# Altium footprint library Connectors.PcbLib: 320 footprints (part 11 of 20)
Each footprint in its own frame and in the unit in brackets; x right, y up, seen from the top. Pads: shape width x height; smd on the part's side, far side on the other; paste and mask are expansions set on the pad; w line width, h text height; cw(c..) or ccw(c..) is an arc to the next point about the centre after c.
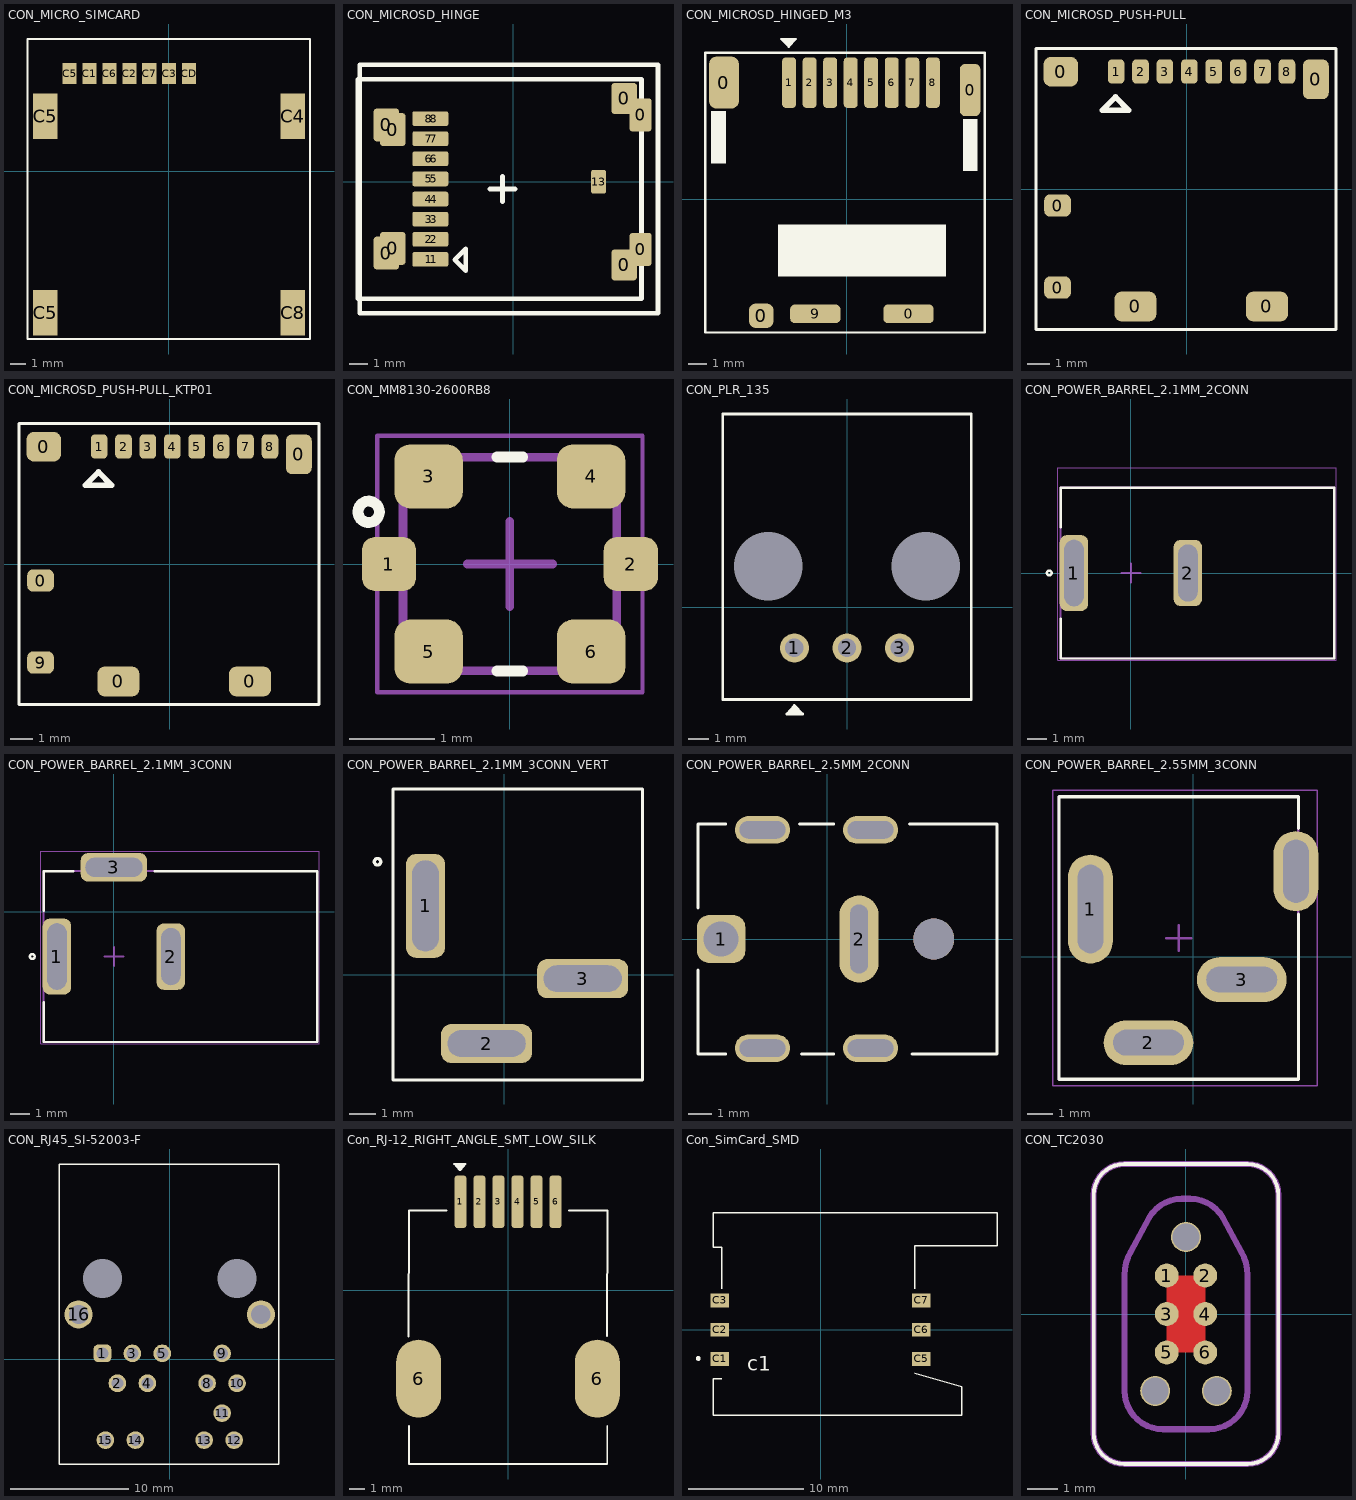
[diagram p10: the footprints below, top view; thin cyan lines are the x and y axes]

## CON_MICRO_SIMCARD [mm] "/20210224/J-E.Pachon"
pads (11):
  rect 0.9x1.35 smd: C1(-5.07,6.235) C2(-2.53,6.235) C3(0.01,6.235) C5(-6.34,6.235) C6(-3.8,6.235) C7(-1.26,6.235) CD(1.28,6.235)
  rect 1.55x2.9 smd: C4(7.9,3.505) C5(-7.9,-9) C5(-7.9,3.505) C8(7.9,-9)
Top Overlay:
  lines w0.127: -9.02,-10.685 -9.02,8.445 8.99,8.445 8.99,-10.685 -9.02,-10.685
3D body: height 1.35, standoff 0, extent -8.72,-10.685 8.722,7.525

## CON_MICROSD_HINGE [mm] "/ 20190710  / C-A.Serna.A"
height 2
pads (25):
  rrect25% 1.4x1.8 smd: 0(-6.95,-3.9) 0(-6.95,3.1) 0(-6.6,-3.65) 0(-6.6,2.85)
  rrect25% 1.4x1.7 smd: 0(6.05,-4.55) 0(6.05,4.55)
  rrect25% 1.2x1.8 smd: 0(6.95,-3.7) 0(6.95,3.65)
  rrect25% 1.8x0.8 smd: 1(-4.625,-4.25) 2(-4.625,-3.15) 3(-4.625,-2.05) 4(-4.625,-0.95) 5(-4.625,0.15) 6(-4.625,1.25) 7(-4.625,2.35) 8(-4.625,3.45)
  rrect25% 1.6x0.8 smd: 1(-4.365,-4.25) 2(-4.365,-3.15) 3(-4.365,-2.05) 4(-4.365,-0.95) 5(-4.365,0.15) 6(-4.365,1.25) 7(-4.365,2.35) 8(-4.365,3.45)
  rrect25% 0.8x1.3 smd: 13(4.65,0)
Top Overlay:
  lines w0.254: -0.6,-0.4 -0.6,0.3 -0.6,-0.4 ; -0.6,-0.4 -0.6,-1.1 -0.6,-0.4 ; -0.6,-0.4 -1.3,-0.4 -0.6,-0.4 ; -0.6,-0.4 0.1,-0.4 -0.6,-0.4 ; -8.5,-6.4 -8.5,5.6 7,5.6 7,-6.4 -8.5,-6.4 ; -8.4,-7.2 7.9,-7.2 7.9,6.4 -8.4,6.4 -8.4,-7.2 ; -3.2,-4.275 -2.6,-3.675 -2.6,-4.875 -3.2,-4.275
3D body: height 2, standoff 0, extent -8.632,-7.375 8.082,6.512

## CON_MICROSD_HINGED_M3 [mm] "/20200714/N-A.Potosi"
pads (13):
  rrect50% 1.6x2.8 smd: 0(-6.6,6.25)
  rrect50% 1.3x1.3 smd: 0(-4.6,-6.25)
  rrect50% 2.7x1 smd: 0(3.3,-6.15) 9(-1.7,-6.15)
  rrect50% 1.1x2.8 smd: 0(6.6,5.85)
  rrect50% 0.75x2.7 smd: 1(-3.1,6.25) 2(-2,6.25) 3(-0.9,6.25) 4(0.2,6.25) 5(1.3,6.25) 6(2.4,6.25) 7(3.5,6.25) 8(4.6,6.25)
Top Overlay:
  region: 7.01,4.3 6.21,4.3 6.21,1.5 7.01,1.5
  region: 5.3,-1.35 -3.7,-1.35 -3.7,-4.15 5.3,-4.15
  region: -6.5,4.72 -7.3,4.72 -7.3,1.92 -6.5,1.92
  region: -2.758,8.589 -3.52,8.589 -3.124,8.175
  lines w0.127: -7.6,-7.15 7.38,-7.15 7.38,7.849 -7.6,7.849 -7.6,-7.15 ; -3.52,8.589 -3.124,8.175 -2.758,8.589 -3.52,8.589
3D body "DM3CS-SF.stp": height 1.98, standoff 0.05, extent -7,-6.85 6.8,7.25

## CON_MICROSD_PUSH-PULL [mm] "/20201014/J-E.Pachon"
pads (14):
  rrect50% 1.2x1 smd: 0(-5.82,-4.445) 0(-5.82,-0.745)
  rrect50% 1.55x1.35 smd: 0(-5.67,5.285)
  rrect50% 1.9x1.35 smd: 0(-2.31,-5.295) 0(3.62,-5.295)
  rrect50% 1.17x1.8 smd: 0(5.82,4.945)
  rrect50% 0.75x1.1 smd: 1(-3.18,5.295) 2(-2.08,5.295) 3(-0.98,5.295) 4(0.12,5.295) 5(1.22,5.295) 6(2.32,5.295) 7(3.42,5.295) 8(4.52,5.295)
Top Overlay:
  lines w0.127: -6.79,-6.325 -6.79,6.325 6.73,6.325 6.73,-6.325 -6.79,-6.325
  lines w0.254: -3.81,3.545 -2.61,3.545 -3.21,4.145 -3.81,3.545
3D body "1040310811.stp": height 1.34, standoff -0.11, extent -6.075,-5.825 5.875,5.575

## CON_MICROSD_PUSH-PULL_KTP01 [mm] "/20220721/F-A.Ospina"
pads (14):
  rrect50% 1.2x1 smd: 0(-5.82,-0.745) 9(-5.82,-4.445)
  rrect50% 1.55x1.35 smd: 0(-5.67,5.285)
  rrect50% 1.9x1.35 smd: 0(-2.31,-5.295) 0(3.62,-5.295)
  rrect50% 1.17x1.8 smd: 0(5.82,4.945)
  rrect50% 0.75x1.1 smd: 1(-3.18,5.295) 2(-2.08,5.295) 3(-0.98,5.295) 4(0.12,5.295) 5(1.22,5.295) 6(2.32,5.295) 7(3.42,5.295) 8(4.52,5.295)
Top Overlay:
  lines w0.127: -6.79,-6.325 6.73,-6.325 6.73,6.325 -6.79,6.325 -6.79,-6.325
  lines w0.254: -3.81,3.545 -3.21,4.145 -2.61,3.545 -3.81,3.545
3D body "1040310811.stp": height 1.34, standoff -0.11, extent -6.075,-5.825 5.875,5.575

## CON_MM8130-2600RB8 [mm] "/ 20190222 / C-A.Serna.A"
pads (6):
  rrect50% 0.635x0.635 smd: 1(-1.414,0) 2(1.414,0)
  rrect50% 0.8x0.75 smd: 3(-0.95,1.025) 4(0.95,1.025) 5(-0.95,-1.025) 6(0.95,-1.025)
Top Overlay:
  circle w0.127: c-1.651,0.61 r0.125
  lines w0.127: -0.15,-1.25 0.15,-1.25 ; -0.15,1.25 0.15,1.25
Mechanical 1:
  lines w0.1: -1.25,-1.25 -1.25,1.25 1.25,1.25 1.25,-1.25 -1.25,-1.25
Mechanical 15:
  lines w0.05: -1.55,-1.5 1.55,-1.5 1.55,1.5 -1.55,1.5 -1.55,-1.5
  lines w0.1: -0.5,0 0.5,0 ; 0,-0.5 0,0.5
3D body "MS-156C3.stp": height 1.36, standoff 0.01, extent -1.16,-1.15 1.14,1.15

## CON_PLR_135 [mm] "/20200728/M-C.Calderon"
pads (5):
  round 1.4 hole 0.889: 1(-2.54,-1.975) 2(0,-1.975) 3(2.54,-1.975)
  round 3.2 hole 3.302 unplated: ""(-3.81,1.975) ""(3.81,1.975)
Top Overlay:
  region: -2.907,-5.166 -2.145,-5.166 -2.54,-4.752
  lines w0.127: -5.994,-4.464 5.994,-4.464 5.994,9.328 0,9.328 -5.994,9.328 -5.994,-4.464 ; -2.907,-5.166 -2.54,-4.752 -2.145,-5.166 -2.907,-5.166
3D body "PLR135-T1.STEP": height 11.52, standoff -4.08, extent -5.75,-4.266 5.75,9.334

## CON_POWER_BARREL_2.1MM_2CONN [mm] "/ 20191002 / C-D Viveros"
pads (2):
  rrect50% 1.5x4 hole 1.016 slot 3.5 at 90 deg: 1(-3,0)
  rrect50% 1.5x3.5 hole 1.016 slot 3 at 90 deg: 2(3,0)
Top Overlay:
  circle w0.127: c-4.3,0 r0.125
  lines w0.127: -3.7,-2.4 -3.7,-4.5 10.7,-4.5 10.7,4.5 -3.7,4.5 -3.7,2.4
Mechanical 1:
  lines w0.1: -3.7,-4.5 10.7,-4.5 10.7,4.5 -3.7,4.5 -3.7,-4.5
Mechanical 15:
  lines w0.05: -3.85,-4.6 10.8,-4.6 10.8,5.55 -3.85,5.55 -3.85,-4.6
  lines w0.1: -0.5,0 0.5,0 ; 0,-0.5 0,0.5
3D body "CUI_PJ-037AH.step": height 11.01, standoff -3.49, extent -3.95,-4.5 10.55,4.5

## CON_POWER_BARREL_2.1MM_3CONN [mm] "/ 20190222 / C-A.Serna.A"
pads (3):
  rrect50% 1.5x4 hole 1.016 slot 3.5 at 90 deg: 1(-3,-2.35)
  rrect50% 1.5x3.5 hole 1.016 slot 3 at 90 deg: 2(3,-2.35)
  rrect50% 3.5x1.5 hole 1.016 slot 3 at 0 deg: 3(0,2.35)
Top Overlay:
  circle w0.127: c-4.3,-2.35 r0.125
  lines w0.127: -3.7,-4.75 -3.7,-6.85 10.7,-6.85 10.7,2.15 2.15,2.15 ; -3.7,0.05 -3.7,2.15 -2.15,2.15
Mechanical 1:
  lines w0.1: -3.7,-6.85 10.7,-6.85 10.7,2.15 -3.7,2.15 -3.7,-6.85
Mechanical 15:
  lines w0.05: -3.85,-6.95 10.8,-6.95 10.8,3.2 -3.85,3.2 -3.85,-6.95
  lines w0.1: -0.5,-2.35 0.5,-2.35 ; 0,-2.85 0,-1.85
3D body "pj-002a.stp": height 11, standoff -3.5, extent -3.7,-6.85 10.7,2.55

## CON_POWER_BARREL_2.1MM_3CONN_VERT [mm] "/20220804/J-E.Pachon"
pads (3):
  rrect50% 1.5x4 hole 1.016 slot 3.5 at 90 deg: 1(-3.025,2.65)
  rrect50% 3.5x1.5 hole 1.016 slot 3 at 0 deg: 2(-0.675,-2.65) 3(3.025,-0.15)
Top Overlay:
  circle w0.127: c-4.875,4.35 r0.125
  lines w0.127: -4.275,-4.05 -4.275,7.15 5.325,7.15 5.325,-4.05 -4.275,-4.05
3D body "694106402002 (rev1).stp": height 13.31, standoff -4.29, extent -3.975,-3.8 5.025,6.9

## CON_POWER_BARREL_2.5MM_2CONN [mm] "/ 20200522/ J-P.Vargas.A"
pads (7):
  rrect50% 2.1x2.1 hole 1.524: 1(-4.625,0)
  oval 1.7x3.8 hole 0.762 slot 3 at 90 deg: 2(1.375,0)
  oval 2.4x1.2 hole 0.762 slot 2 at 0 deg: ""(-2.825,-4.75) ""(-2.825,4.75) ""(1.875,-4.75) ""(1.875,4.75)
  round 1.778 hole 1.778 unplated: ""(4.625,0)
Top Overlay:
  lines w0.127: -5.625,-1.35 -5.625,-5 -4.425,-5 ; -5.625,1.35 -5.625,5 -4.425,5 ; -1.225,5 0.275,5 ; -1.125,-5 0.275,-5 ; 3.575,5 7.375,5 7.375,-5 3.675,-5
3D body "JACK-C-PC-10A-RA(R).stp": height 10.01, standoff -2.19, extent -5.604,-5.002 7.396,5.002

## CON_POWER_BARREL_2.55MM_3CONN [mil] "/ 20190617/ J-P.Vargas.A"
pads (4):
  oval 70x170 hole 40 slot 137.8 at 90 deg: 1(-160.43,74.8)
  oval 140x70 hole 40 slot 110.24 at 0 deg: 2(-69.88,-133.86) 3(75.79,-35.43)
  oval 70x125 hole 40 slot 98.43 at 90 deg: ""(160.43,133.86)
Top Overlay:
  lines w5: 164.37,66.93 164.37,-190.94 -209.65,-190.94 -209.65,250 164.37,250 164.37,200.79
Mechanical 1:
  lines w3.94: -209.65,-190.94 164.37,-190.94 164.37,250 -209.65,250 -209.65,-190.94
Mechanical 15:
  lines w1.97: -219.49,-200.79 193.9,-200.79 193.9,259.84 -219.49,259.84 -219.49,-200.79
  lines w3.94: -42.32,29.53 -2.95,29.53 ; -22.64,9.84 -22.64,49.21
3D body "dcj250-15-a-k1-c_reva.step": height 572.83, standoff -57.18, extent -209.65,-190.94 164.37,250

## CON_RJ45_SI-52003-F [mm] "/ 20190222 / C-A.Serna.A"
pads (17):
  rrect50% 1.5x1.5 hole 1.016: 1(-5.715,0.51)
  round 1.5 hole 1.016: 2(-4.445,-2.03) 3(-3.175,0.51) 4(-1.905,-2.03) 5(-0.635,0.51) 8(3.175,-2.03) 9(4.445,0.51) 10(5.715,-2.03) 11(4.445,-4.57) 12(5.465,-6.86) 13(2.922,-6.86) 14(-2.925,-6.86) 15(-5.465,-6.86)
  round 2.4 hole 1.651: 16(-7.745,3.81) ""(7.745,3.81)
  round 3.25 hole 3.302: ""(-5.715,6.86) ""(5.715,6.86)
Top Overlay:
  lines w0.127: -9.373,-8.888 9.246,-8.888 9.246,16.588 -9.373,16.588 -9.373,-8.888
3D body: height 15.21, standoff 0, extent -9.195,-8.837 8.785,16.563

## Con_RJ-12_RIGHT_ANGLE_SMT_LOW_SILK [mm] "/ 20190222 / C-A.Serna.A"
pads (8):
  rrect50% 0.8x3.5 smd: 1(-3.175,5.898) 2(-1.905,5.898) 3(-0.635,5.898) 4(0.635,5.898) 5(1.905,5.898) 6(3.175,5.898)
  oval 3x5.21 smd: 6(-5.965,-5.897) 6(5.965,-5.897)
Top Overlay:
  region: -2.836,8.417 -3.598,8.417 -3.203,8.003
  lines w0.127: -6.629,-3.081 -6.609,5.301 ; -6.609,5.313 -4.09,5.313 ; -6.59,-9.052 -6.59,-11.592 6.618,-11.592 6.618,-9.052 ; 4.053,5.313 6.634,5.313 6.613,-3.069 ; -3.598,8.417 -3.203,8.003 -2.836,8.417 -3.598,8.417
3D body "441440005.stp": height 11.75, standoff 0.01, extent -6.579,-11.603 6.629,6.786

## Con_SimCard_SMD [mm] "/20220113/J-E.Pachon"
pads (6):
  rect 1.6x1.2 smd: C1(-8.75,-2.54) C2(-8.75,0) C3(-8.75,2.54) C5(8.75,-2.54) C6(8.75,0) C7(8.75,2.54)
Top Overlay:
  circle w0.2: c-10.6,-2.49 r0.112
  lines w0.127: -8.55,-4.24 -9.3,-4.24 -9.3,-7.44 12.25,-7.44 12.25,-4.94 8.15,-3.79 ; -8.55,3.56 -8.55,7.16 -9.3,7.16 -9.3,10.16 15.3,10.16 15.3,7.26 8.15,7.26 8.15,3.56
  text "c1" at -6.35,-3.55 h1.27
3D body "693012040811.stp": height 1.81, standoff -0.08, extent -9.337,-7.448 15.263,10.27

## CON_TC2030 [mil] "/ 20191204/C-A.Serna.A"
pads (9):
  round 31 smd paste-196.85: 1(-25,50) 2(25,50) 3(-25,0) 4(25,0) 5(-25,-50) 6(25,-50)
  round 39 hole 35 unplated: ""(-40,-100) ""(0,100) ""(40,-100)
Top Layer:
  pour cut-out: 25,50 -25,50 -25,-50 25,-50
Top Overlay:
  lines w5: -120,-155 ccw(c-80,-155) -80,-195 80,-195 ccw(c80,-155) 120,-155 120,155 ccw(c80,155) 80,195 -80,195 ccw(c-80,155) -120,155 -120,-155
Mechanical 15:
  lines w7.87: -79.92,-99.96 -80,51 cw(c-21.41,51) -72.15,80.29 -48.17,124.92 cw(c-5,100) -5,149.84 5,149.84 cw(c5,100) 48.17,124.92 72.15,80.29 cw(c21.41,51) 80,51 79.92,-100 ; -79.8,-99.96 ccw(c-29.96,-99.96) -30,-149.8 30,-149.8 ccw(c30,-99.96) 79.84,-100 ; -120,-155 ccw(c-80,-155) -80,-195 80,-195 ccw(c80,-155) 120,-155 120,155 ccw(c80,155) 80,195 -80,195 ccw(c-80,155) -120,155 -120,-155